# Altium schematic symbol library USB2.0.SchLib: 1 symbol
Pins are listed as number, name and electrical type; pins without a type are passive.

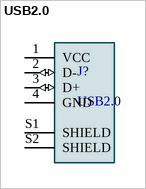
[diagram p0: symbol USB2.0]

## USB2.0
designator J?
USB 2.0; MP: 0480372200; MF: Molex; SnapEDA_Link: https://www.snapeda.com/parts/0480372200/Molex/view-part/446991/?ref=snap; DigiKey-Purchase-URL: https://snapeda.com/shop?store=DigiKey&id=446991; Arrow_Electronics-Purchase-URL: https://snapeda.com/shop?store=Arrow+Electronics&id=446991; Availability: Good; Package: None; Price: None; Value: *
footprint USB_A (MOLEX_67643-0910)
footprint USB_B (USB B F RA)
footprint USB_A_SMD_Male (USB TYPE-A SMD Male)
pins: 1 VCC (power), 2 D- (io), 3 D+ (io), 4 GND, S1 SHIELD, S2 SHIELD